# Altium footprint library CL10B103KA8WPNC.PcbLib: 3 footprints
Each footprint in its own frame and in the unit in brackets; x right, y up, seen from the top. Pads: shape width x height; smd on the part's side, far side on the other; paste and mask are expansions set on the pad; w line width, h text height; cw(c..) or ccw(c..) is an arc to the next point about the centre after c.
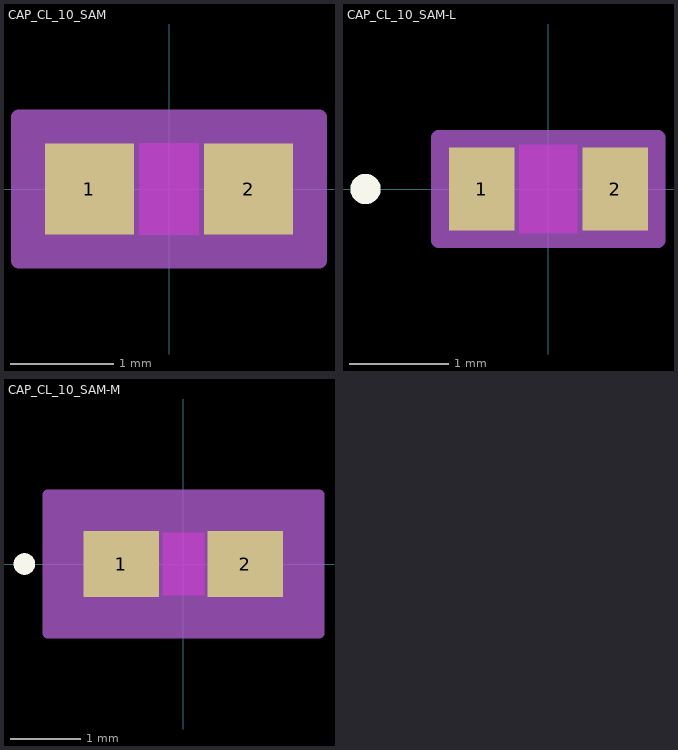
[diagram p0: the footprints below, top view; thin cyan lines are the x and y axes]

## CAP_CL_10_SAM [mil]
pads (2):
  rect 34x35 smd paste+0 mask+0: 1(-30.5,0) 2(30.5,0)
Top Layer keep-out:
  region: -11.5,-15.5 -11.5,15.5 11.5,15.5 11.5,-15.5
Top Overlay:
  text ".Designator" at -137.5,-25 h50
Keep-Out Layer:
  region: -11.5,-17.5 -11.5,17.5 11.5,17.5 11.5,-17.5
Mechanical 13:
  circle w1: c-25.5,0 r0
  lines w1: -33.5,-17.5 -33.5,17.5 ; -33.5,-17.5 -13.5,-17.5 -13.5,17.5 -33.5,17.5 ; -33.5,-17.5 33.5,-17.5 ; -33.5,-17.5 -33.5,17.5 ; -33.5,17.5 33.5,17.5 ; 33.5,-17.5 13.5,-17.5 13.5,17.5 33.5,17.5 ; 33.5,-17.5 33.5,17.5 ; 33.5,-17.5 33.5,17.5
  text ".Designator" at -137.5,-25 h50
Mechanical 15:
  region: 57.5,-27.5 -57.5,-27.5 -57.5,27.5 57.5,27.5
  lines w6: -57.5,-27.5 -57.5,27.5 57.5,27.5 57.5,-27.5 -57.5,-27.5
3D body "CAP_CL_10_SAM.step": height 35, standoff 0, extent -33.5,-17.48 33.5,17.48

## CAP_CL_10_SAM-L [mil]
pads (2):
  rect 26x33 smd paste+0 mask+0: 1(-26.5,0) 2(26.5,0)
Top Layer keep-out:
  region: -11.5,-15.5 -11.5,15.5 11.5,15.5 11.5,-15.5
Top Overlay:
  circle w6: c-72.5,0 r3
  text ".Designator" at -137.5,-25 h50
Keep-Out Layer:
  region: -11.5,-17.5 -11.5,17.5 11.5,17.5 11.5,-17.5
Mechanical 13:
  circle w1: c-21.5,0 r3
  lines w1: -33.5,-17.5 -33.5,17.5 ; -33.5,-17.5 -13.5,-17.5 -13.5,17.5 -33.5,17.5 ; -33.5,-17.5 33.5,-17.5 ; -33.5,-17.5 -33.5,17.5 ; -33.5,17.5 33.5,17.5 ; 33.5,-17.5 13.5,-17.5 13.5,17.5 33.5,17.5 ; 33.5,-17.5 33.5,17.5 ; 33.5,-17.5 33.5,17.5
  text ".Designator" at -137.5,-25 h50
Mechanical 15:
  region: 43.5,-20.5 -43.5,-20.5 -43.5,20.5 43.5,20.5
  lines w6: -43.5,-20.5 -43.5,20.5 43.5,20.5 43.5,-20.5 -43.5,-20.5
3D body "CAP_CL_10_SAM.step": height 35, standoff 0, extent -33.5,-17.48 33.5,17.48

## CAP_CL_10_SAM-M [mil]
pads (2):
  rect 42x37 smd paste+0 mask+0: 1(-34.5,0) 2(34.5,0)
Top Layer keep-out:
  region: -11.5,-15.5 -11.5,15.5 11.5,15.5 11.5,-15.5
Top Overlay:
  circle w6: c-88.5,0 r3
  text ".Designator" at -137.5,-25 h50
Keep-Out Layer:
  region: -11.5,-17.5 -11.5,17.5 11.5,17.5 11.5,-17.5
Mechanical 13:
  circle w1: c-29.5,0 r3
  lines w1: -33.5,-17.5 -33.5,17.5 ; -33.5,-17.5 -13.5,-17.5 -13.5,17.5 -33.5,17.5 ; -33.5,-17.5 33.5,-17.5 ; -33.5,-17.5 -33.5,17.5 ; -33.5,17.5 33.5,17.5 ; 33.5,-17.5 13.5,-17.5 13.5,17.5 33.5,17.5 ; 33.5,-17.5 33.5,17.5 ; 33.5,-17.5 33.5,17.5
  text ".Designator" at -137.5,-25 h50
Mechanical 15:
  region: 75.5,-38.5 -75.5,-38.5 -75.5,38.5 75.5,38.5
  lines w6: -75.5,-38.5 -75.5,38.5 75.5,38.5 75.5,-38.5 -75.5,-38.5
3D body "CAP_CL_10_SAM.step": height 35, standoff 0, extent -33.5,-17.48 33.5,17.48